# Altium integrated library TRANSISTORS.IntLib: 7 symbols
Pins are listed as number, name and electrical type; pins without a type are passive.

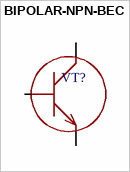
[diagram p0: symbol BIPOLAR-NPN-BEC]

## BIPOLAR-NPN-BEC
designator VT?
footprint TO-92
footprint SOT23-3
footprint TO-220-3
footprint TO-252
footprint TO-247-3
footprint SOT-223-3
footprint TO-220(bend2)
footprint SOT-89
footprint TO-126
pins: 1 B, 2 C, 3 E


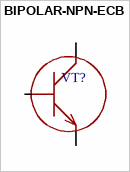
[diagram p1: symbol BIPOLAR-NPN-ECB]

## BIPOLAR-NPN-ECB
designator VT?
footprint SOT23-3
footprint TO-92
footprint TO-252
footprint TO-220-3
footprint TO-247-3
footprint SOT-223-3
footprint TO-220-3-BEND
footprint TO-126
footprint SOT-89
pins: 1 E, 2 C, 3 B


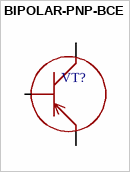
[diagram p2: symbol BIPOLAR-PNP-BCE]

## BIPOLAR-PNP-BCE
designator VT?
footprint TO-92
footprint SOT23-3
footprint TO-252
footprint TO-220-3
footprint TO-247-3
footprint SOT-223-3
footprint TO-220-3-BEND
footprint TO-126
footprint SOT-89
pins: 1 B, 2 C, 3 E


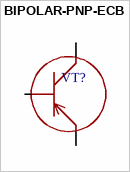
[diagram p3: symbol BIPOLAR-PNP-ECB]

## BIPOLAR-PNP-ECB
designator VT?
footprint TO-92
footprint SOT23-3
footprint TO-252
footprint TO-220-3
footprint TO-247-3
footprint SOT-223-3
footprint TO-220(bend2)
footprint TO-126
footprint SOT-89
pins: 1 E, 2 C, 3 B


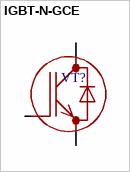
[diagram p4: symbol IGBT-N-GCE]

## IGBT-N-GCE
designator VT?
footprint TO-92
footprint SOT23-3
footprint TO-252
footprint TO-220-3
footprint TO-247-3
footprint SOT-223-3
footprint TO-220-3-BEND
pins: 1 G, 2 C, 3 E


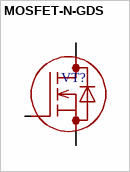
[diagram p5: symbol MOSFET-N-GDS]

## MOSFET-N-GDS
designator VT?
footprint TO-92
footprint SOT23-3
footprint TO-252
footprint TO-220-3
footprint TO-247-3
footprint SOT-223-3
footprint TO-220-3-BEND
footprint TO-126
footprint SOT-89
pins: 1 G, 2 D, 3 S


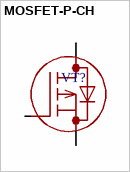
[diagram p6: symbol MOSFET-P-CH]

## MOSFET-P-CH
designator VT?
footprint TO-92
footprint SOT23-3
footprint TO-252
footprint TO-220-3
footprint TO-247-3
footprint SOT-223-3
footprint TO-220-3-BEND
footprint SOT-89
footprint TO-126
pins: 1 G, 2 D, 3 S